# Altium footprint library MAJ library.PcbLib: 15 footprints
Each footprint in its own frame and in the unit in brackets; x right, y up, seen from the top. Pads: shape width x height; smd on the part's side, far side on the other; paste and mask are expansions set on the pad; w line width, h text height; cw(c..) or ccw(c..) is an arc to the next point about the centre after c.
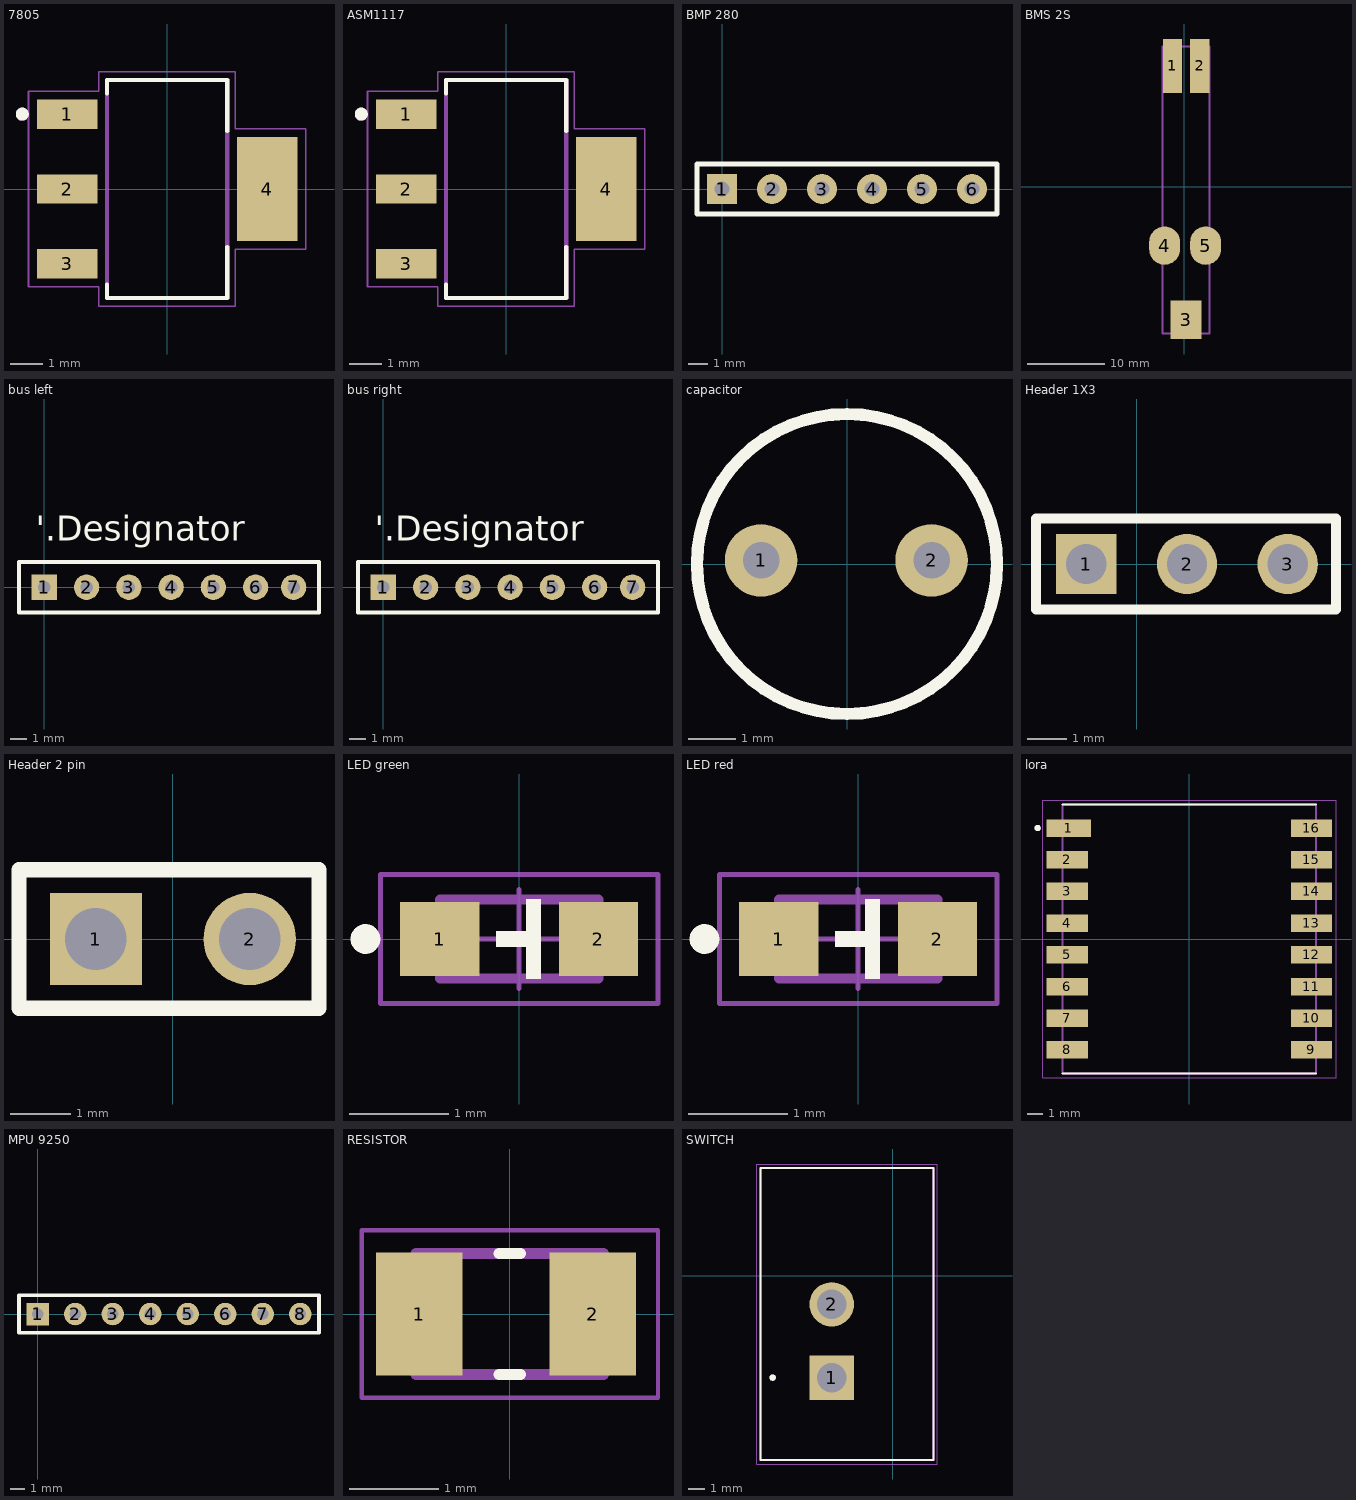
[diagram p0: the footprints below, top view; thin cyan lines are the x and y axes]

## 7805 [mm]
pads (4):
  rect 1.86x0.9 smd: 1(-3.075,2.3) 2(-3.075,0) 3(-3.075,-2.3)
  rect 1.86x3.19 smd: 4(3.075,0)
Top Overlay:
  circle w0.2: c-4.452,2.3 r0.1
  lines w0.127: -1.85,-2.933 -1.85,-3.35 1.85,-3.35 1.85,-1.779 ; -1.85,2.933 -1.85,3.35 1.85,3.35 1.85,1.779
Mechanical 13:
  circle w0.2: c-4.452,2.3 r0.1
  lines w0.127: -1.85,-3.35 -1.85,3.35 1.85,3.35 1.85,-3.35 -1.85,-3.35
Mechanical 15:
  lines w0.05: -4.26,-3 -4.26,3 -2.1,3 -2.1,3.6 2.1,3.6 2.1,1.85 4.26,1.85 4.26,-1.85 2.1,-1.85 2.1,-3.6 -2.1,-3.6 -2.1,-3 -4.26,-3
3D body "DCY0004A.stp": height 1.68, standoff 0, extent -3.601,-3.301 3.398,3.199

## ASM1117 [mm]
pads (4):
  rect 1.86x0.9 smd: 1(-3.075,2.3) 2(-3.075,0) 3(-3.075,-2.3)
  rect 1.86x3.19 smd: 4(3.075,0)
Top Overlay:
  circle w0.2: c-4.452,2.3 r0.1
  lines w0.127: -1.85,-2.933 -1.85,-3.35 1.85,-3.35 1.85,-1.779 ; -1.85,2.933 -1.85,3.35 1.85,3.35 1.85,1.779
Mechanical 13:
  circle w0.2: c-4.452,2.3 r0.1
  lines w0.127: -1.85,-3.35 1.85,-3.35 1.85,3.35 -1.85,3.35 -1.85,-3.35
Mechanical 15:
  lines w0.05: -4.26,-3 -2.1,-3 -2.1,-3.6 2.1,-3.6 2.1,-1.85 4.26,-1.85 4.26,1.85 2.1,1.85 2.1,3.6 -2.1,3.6 -2.1,3 -4.26,3 -4.26,-3
3D body "DCY0004A.stp": height 1.68, standoff 0, extent -3.576,-3.326 3.424,3.174

## BMP 280 [mil]
pads (7):
  round 60 hole 30: 1(0,0) 2(100,0) 3(200,0) 4(300,0) 5(400,0) 6(500,0)
  rect 60x60 hole 30: 1(0,0)
Top Overlay:
  lines w10: -50,-50 -50,50 550,50 550,-50 -50,-50
3D body "bmp280_module.stp": height 126.54, standoff -373.29, extent -46.18,-387.23 553.82,45.84

## BMS 2S [mm]
pads (5):
  rect 2.5x7 smd: 1(-1.524,15.748) 2(2.032,15.748)
  rect 4x5 smd: 3(0.254,-17.272)
  oval 4x5 smd: 4(-2.54,-7.62) 5(2.794,-7.62)
Mechanical 1:
  lines w0.254: -2.794,-19.05 3.302,-19.05 3.302,18.288 -2.794,18.288 -2.794,-19.05
  text "'.Designator" at 1.042,-18.313 h1.52
3D body: height 2.54, standoff 0, extent -2.794,-19.05 3.302,18.288
3D body: height 1.27, standoff 0, extent 1.905,-10.157 5.715,-5.083

## bus left [mil]
pads (7):
  rect 60x60 hole 30: 1(0,0)
  round 60 hole 30: 2(100,0) 3(200,0) 4(300,0) 5(400,0) 6(500,0) 7(590,0)
Top Overlay:
  lines w10: -60,-60 650,-60 650,60 -60,60 -60,-60
  text "'.Designator" at -20,109.99 h60
3D body "DW-07-09-S-S-405.stp": height 620.5, standoff -109.5, extent -50,-50 650,50

## bus right [mil]
pads (7):
  rect 60x60 hole 30: 1(0,0)
  round 60 hole 30: 2(100,0) 3(200,0) 4(300,0) 5(400,0) 6(500,0) 7(590,0)
Top Overlay:
  lines w10: -60,-60 650,-60 650,60 -60,60 -60,-60
  text "'.Designator" at -20,109.99 h60
3D body "DW-07-09-S-S-405.stp": height 620.5, standoff -109.5, extent -50,-50 650,50

## capacitor [mil]
pads (2):
  round 60 hole 30: 1(-71,3) 2(70,3)
Top Overlay:
  circle w10: c0,0 r124.02
Mechanical 1:
  text "'.Designator" at -147,-23.01 h60
3D body "CAP_UES_8X11P5_NCH.step": height 492.6, standoff -172.01, extent -156.04,-154.75 160,160

## Header 1X3 [mil]
pads (3):
  rect 60x60 hole 40: 1(-50,0)
  round 60 hole 40: 2(50,0) 3(150,0)
Top Overlay:
  lines w10: -100,-45 -100,45 198,45 198,-45 -100,-45
Mechanical 1:
  text "'.Designator" at -265,6.99 h60
3D body "CONN3X1_B3P-VH_JST.step": height 429.02, standoff -200, extent -184.86,-170 282.86,164.96

## Header 2 pin [mil]
pads (2):
  rect 60x60 hole 40: 1(-50,0)
  round 60 hole 40: 2(50,0)
Top Overlay:
  lines w10: -100,-45 95,-45 95,45 -100,45 -100,-45
Mechanical 1:
  text "'.Designator" at -279,132.99 h60
3D body "640457-2.step": height 230, standoff -140, extent -100,-15 100,420

## LED green [mm] "SMD Mono-color Chip LED, body 1.6x0.8mm"
height 0.4
pads (2):
  rect 0.8x0.75 smd: 1(-0.8,0) 2(0.8,0)
Top Overlay:
  circle w0.15: c-1.55,0 r0.075
  region: 0.22,0.4 0.22,-0.4 0.07,-0.4 0.07,-0.08 -0.23,-0.08 -0.23,0.08 0.07,0.08 0.07,0.4
Top Courtyard:
  lines w0.05: -1.4,-0.65 1.4,-0.65 1.4,0.65 -1.4,0.65 -1.4,-0.65
Top Designator:
  text ".Designator" at -2.499,-0.167 h0.5
Top Component Outline:
  region: 0.22,0.4 0.22,-0.4 0.07,-0.4 0.07,-0.08 -0.23,-0.08 -0.23,0.08 0.07,0.08 0.07,0.4
  lines w0.1: -0.8,-0.4 0.8,-0.4 0.8,0.4 -0.8,0.4 -0.8,-0.4
Top Component Center:
  lines w0.05: -0.5,0 0.5,0 ; 0,-0.5 0,0.5
3D body "everlight-17-21-0805LED-GREEN.step": height 1.12, standoff 0.01, extent -1,-0.615 1,0.635

## LED red [mm] "SMD Mono-color Chip LED, body 1.6x0.8mm"
height 0.4
pads (2):
  rect 0.8x0.75 smd: 1(-0.8,0) 2(0.8,0)
Top Overlay:
  circle w0.15: c-1.55,0 r0.075
  region: 0.22,0.4 0.22,-0.4 0.07,-0.4 0.07,-0.08 -0.23,-0.08 -0.23,0.08 0.07,0.08 0.07,0.4
Top Courtyard:
  lines w0.05: -1.4,-0.65 1.4,-0.65 1.4,0.65 -1.4,0.65 -1.4,-0.65
Top Designator:
  text ".Designator" at -2.499,-0.167 h0.5
Top Component Outline:
  region: 0.22,0.4 0.22,-0.4 0.07,-0.4 0.07,-0.08 -0.23,-0.08 -0.23,0.08 0.07,0.08 0.07,0.4
  lines w0.1: -0.8,-0.4 0.8,-0.4 0.8,0.4 -0.8,0.4 -0.8,-0.4
Top Component Center:
  lines w0.05: -0.5,0 0.5,0 ; 0,-0.5 0,0.5
3D body "User Library-LED-0805-R.step": height 1.1, standoff 0, extent -1,-0.625 1,0.625

## lora [mm]
height 3.3
pads (16):
  rect 2.8x1.1 smd: 1(-7.6,7)
  rect 2.6x1.1 smd: 2(-7.7,5) 3(-7.7,3) 4(-7.7,1) 5(-7.7,-1) 6(-7.7,-3) 7(-7.7,-5) 8(-7.7,-7) 9(7.7,-7) 10(7.7,-5) 11(7.7,-3) 12(7.7,-1) 13(7.7,1) 14(7.7,3) 15(7.7,5) 16(7.7,7)
Top Overlay:
  circle w0.2: c-9.576,7 r0.1
  lines w0.127: -8,-8.5 8,-8.5 ; -8,8.5 8,8.5
Mechanical 13:
  circle w0.2: c-9.576,7 r0.1
  lines w0.127: -8,-8.5 -8,8.5 8,8.5 8,-8.5 -8,-8.5
Mechanical 15:
  lines w0.05: -9.25,-8.75 -9.25,8.75 9.25,8.75 9.25,-8.75 -9.25,-8.75
3D body "step_temp.STEP": height 3.3, standoff 0, extent -8,-8.5 8,8.5

## MPU 9250 [mil]
pads (9):
  rect 60x60 hole 30: 1(0,0)
  round 60 hole 30: 1(0,0) 2(100,0) 3(200,0) 4(300,0) 5(400,0) 6(500,0) 7(600,0) 8(700,0)
Top Overlay:
  lines w10: -50,-50 750,-50 750,50 -50,50 -50,-50
3D body "MPU-9250.stp": height 129.28, standoff -373.69, extent -150,-540.55 850,50

## RESISTOR [mm]
pads (2):
  rect 0.97x1.38 smd: 1(-1.016,0) 2(0.93,0)
Top Overlay:
  lines w0.127: -0.12,-0.68 0.12,-0.68 ; -0.12,0.68 0.12,0.68
Mechanical 1:
  text "'.Designator" at -8.865,-0.407 h1.52
Mechanical 13:
  lines w0.127: -1.05,-0.68 1.05,-0.68 1.05,0.68 -1.05,0.68 -1.05,-0.68
Mechanical 15:
  lines w0.05: -1.665,-0.94 1.665,-0.94 1.665,0.94 -1.665,0.94 -1.665,-0.94
3D body "User Library-CR2012-0805 (1).step": height 0.61, standoff 0.01, extent -1.016,-0.625 0.984,0.625

## SWITCH [mm]
height 18.41
pads (2):
  rect 2.775x2.775 / inner round 2.775 / far side rect 2.775x2.775 hole 1.85: 1(-3.81,-6.35)
  round 2.775 hole 1.85: 2(-3.81,-1.778)
Top Overlay:
  circle w0.2: c-7.5,-6.35 r0.1
  lines w0.127: -8.255,-11.495 -8.255,6.731 2.54,6.731 2.54,-11.495 -8.255,-11.495
Mechanical 1:
  text "'.Designator" at -8.382,-9.144 h1.52
Mechanical 13:
  circle w0.2: c-7.5,-6.35 r0.1
  lines w0.127: -8.255,-11.495 -8.255,6.731 2.54,6.731 2.54,-11.495 -8.255,-11.495
Mechanical 15:
  lines w0.05: -8.484,-11.745 2.769,-11.745 2.769,6.985 -8.484,6.985 -8.484,-11.745
3D body "GF-123-0054--3DModel-STEP-56544.STEP": height 13.22, standoff -5.8, extent -7.925,-9.855 2.235,6.604